# Altium footprint library Connectors.PcbLib: 113 footprints (part 4 of 8)
Each footprint in its own frame and in the unit in brackets; x right, y up, seen from the top. Pads: shape width x height; smd on the part's side, far side on the other; paste and mask are expansions set on the pad; w line width, h text height; cw(c..) or ccw(c..) is an arc to the next point about the centre after c.
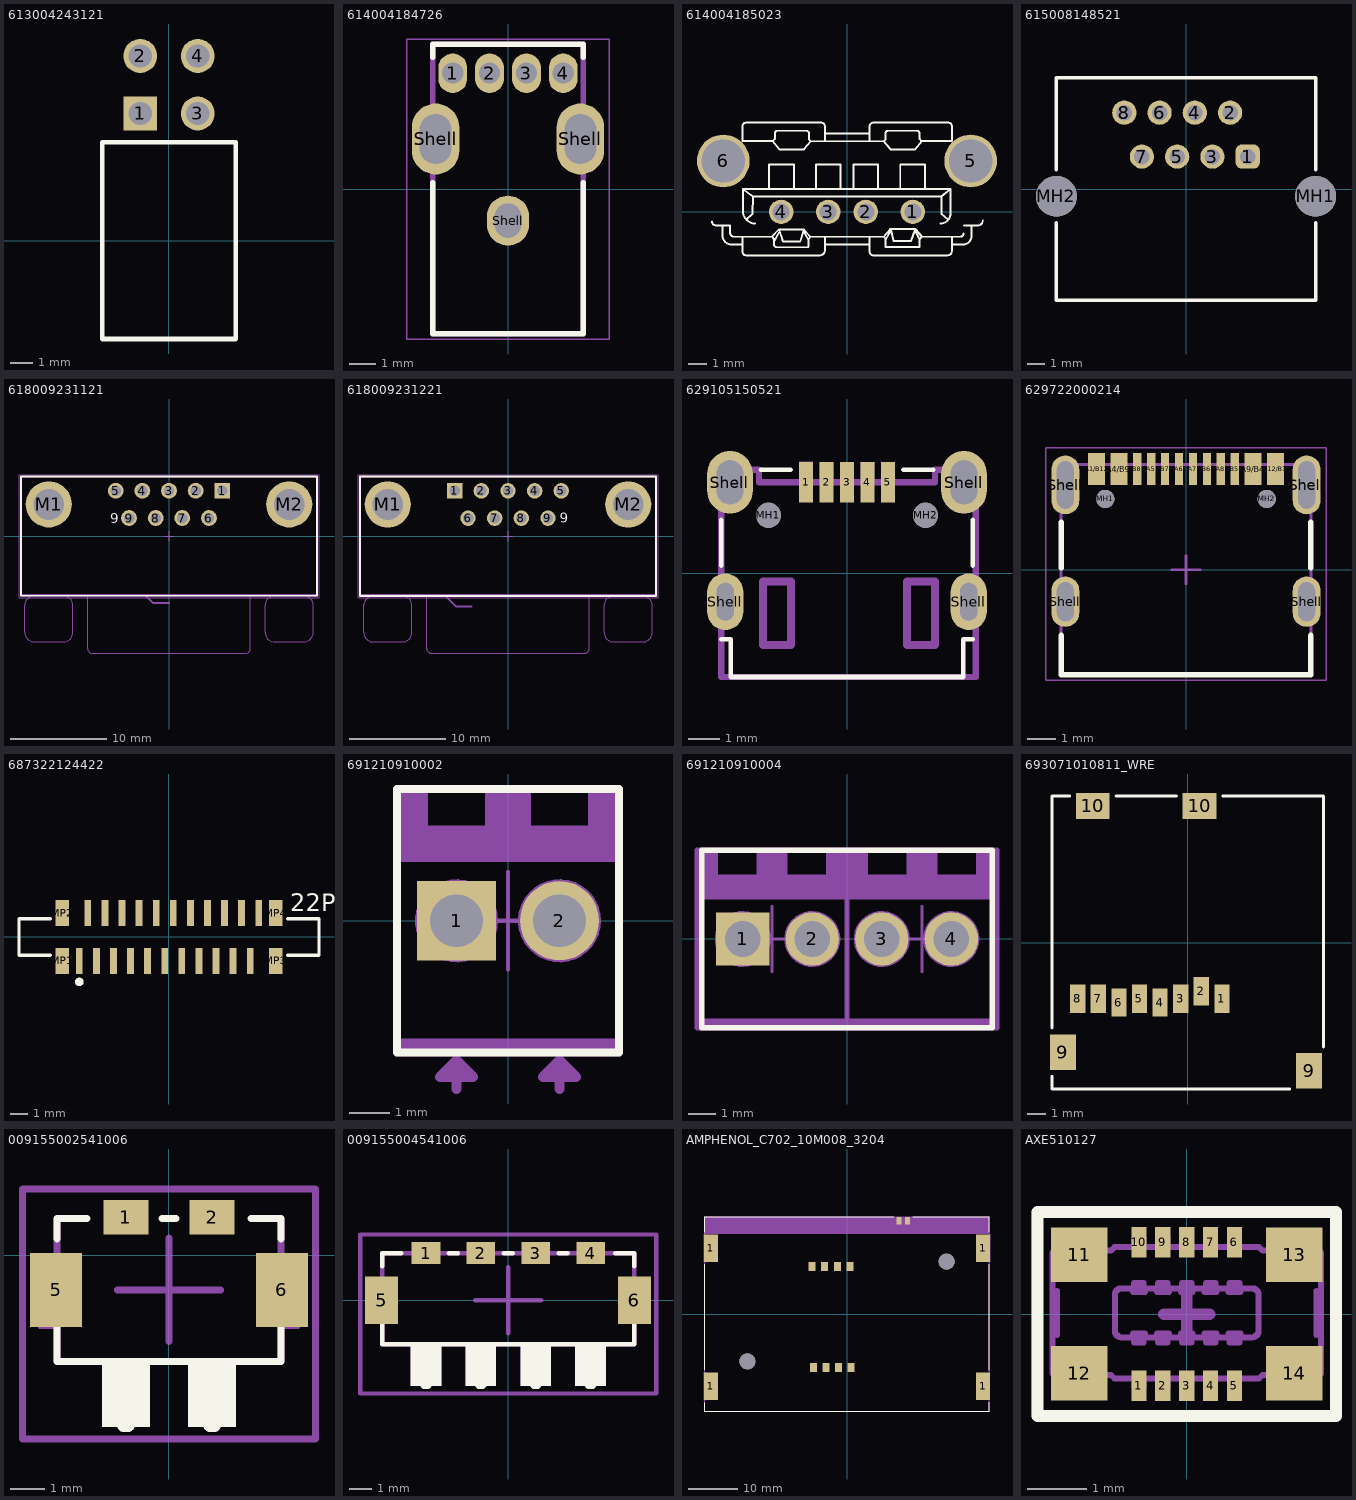
[diagram p3: the footprints below, top view; thin cyan lines are the x and y axes]

## 613004243121 [mm] "Socket Header, Pitch 2.54 mm, THT, Angled, dual row, 4p"
height 5.08
pads (4):
  rect 1.5x1.5 hole 1.02: 1(-1.27,5.61)
  round 1.5 hole 1.02: 2(-1.27,8.15) 3(1.27,5.61) 4(1.27,8.15)
Top Overlay:
  lines w0.2: -2.94,-4.35 2.94,-4.35 2.94,4.35 -2.94,4.35 -2.94,-4.35
3D body "613004243121.stp": height 5.05, standoff -3.25, extent -2.79,-4.25 2.79,8.35

## 614004184726 [mm] "USB 2.0 Type A Up Right THT"
height 14.2
pads (7):
  oval 1.1x1.5 hole 0.8: 1(-2.1,4.4) 2(-0.7,4.4) 3(0.7,4.4) 4(2.1,4.4)
  oval 1.8x2.7 hole 1.2 slot 1.9 at 90 deg: Shell(-2.75,1.9) Shell(2.75,1.9)
  oval 1.6x1.9 hole 1 slot 1.3 at 90 deg: Shell(0,-1.2)
Top Overlay:
  lines w0.2: -2.86,0.25 -2.86,-5.5 2.86,-5.5 2.86,0.25 ; -2.86,5 -2.86,5.5 2.86,5.5 2.86,5
Top Assembly:
  lines w0.2: -2.86,-5.5 -2.86,5.5 2.86,5.5 2.86,-5.5 -2.86,-5.5
  text ".Designator" at 0.5,-7.497 h1.5
Mechanical 15:
  lines w0.05: -3.85,-5.7 -3.85,5.7 3.85,5.7 3.85,-5.7 -3.85,-5.7
3D body "614004184726.stp": height 14.3, standoff -2.74, extent -3.559,-5.5 3.559,5.5

## 614004185023 [mm]
pads (6):
  round 1.3 / inner round 1.524 / far side round 1.3 hole 0.9: 1(3.5,0) 2(1,0) 3(-1,0) 4(-3.5,0)
  round 2.8 / inner round 1.524 / far side round 2.8 hole 2.3: 5(6.57,2.71) 6(-6.57,2.71)
Top Overlay:
  lines w0.102: -7.175,-0.507 ccw(c-6.961,-0.507) -6.961,-0.721 -6.211,-0.721 -6.211,-1.107 ccw(c-5.997,-1.107) -5.997,-1.321 -3.962,-1.321 -3.877,-1.471 -3.877,-1.728 ccw(c-3.727,-1.728) -3.727,-1.878 -2.099,-1.878 ccw(c-2.099,-1.835) -2.056,-1.835 -2.056,-1.471 ; -6.618,-0.743 -6.618,-1.257 ccw(c-6.147,-1.257) -6.147,-1.728 -5.547,-1.728 ; -5.547,-1.321 -5.547,-1.728 ; -5.547,3.755 -5.547,4.569 cw(c-5.376,4.569) -5.376,4.74 -1.349,4.74 cw(c-1.349,4.569) -1.178,4.569 -1.178,3.755 ; -5.547,3.777 -3.919,3.777 -3.834,3.884 -3.834,4.183 cw(c-3.705,4.183) -3.705,4.312 -2.163,4.312 cw(c-2.163,4.162) -2.013,4.162 -2.013,3.841 -1.928,3.755 ; -5.333,-0.378 -5.012,-0.1 -4.99,0.821 ; -4.883,-0.614 cw(c-4.883,0.028) -5.526,0.029 -5.526,1.206 ; -4.134,1.249 -4.134,2.513 -2.806,2.513 -2.806,1.249 ; -3.962,-1.299 -3.619,-0.935 -2.292,-0.935 -1.949,-1.321 ; -3.941,3.755 -3.598,3.327 -2.292,3.327 -1.928,3.755 ; -3.855,-1.514 -3.598,-1.064 ; -3.598,-0.957 -3.405,-1.578 -2.485,-1.578 -2.313,-1.021 -2.056,-1.471 ; -1.671,1.228 -1.649,1.228 -1.649,2.513 -0.343,2.513 -0.343,1.271 ; -1.157,-1.728 1.199,-1.728 ; -1.157,4.162 1.199,4.162 ; 0.343,1.249 0.343,2.513 1.649,2.513 1.649,1.228 ; 1.199,-1.321 1.199,-1.728 ; 2.056,-1.471 2.335,-0.957 2.463,-1.535 3.405,-1.535 3.619,-0.957 ; 2.827,1.228 2.827,2.513 4.134,2.513 4.134,1.228 ; 3.598,-0.978 3.855,-1.45 ; 3.962,3.755 3.619,3.327 2.313,3.327 1.949,3.755 ; 4.969,-0.614 ccw(c4.969,-0.079) 5.504,-0.079 5.504,1.206 5.483,1.206 ; 5.355,-0.4 5.012,-0.1 5.012,0.821 ; 6.19,-1.15 cw(c6.018,-1.15) 6.019,-1.321 5.569,-1.321 ; 6.211,-0.721 6.939,-0.721 ccw(c6.939,-0.443) 7.218,-0.443 ; 6.618,-0.743 6.618,-1.278 cw(c6.168,-1.278) 6.168,-1.728 5.569,-1.728 ; -5.547,-1.728 -5.547,-2.135 ccw(c-5.376,-2.135) -5.376,-2.306 -1.435,-2.306 ccw(c-1.435,-2.049) -1.178,-2.049 -1.178,-1.321 ; -5.526,1.206 -4.99,0.821 ; -5.526,1.206 5.483,1.206 ; -4.99,0.821 5.012,0.821 ; -2.056,-1.471 -1.949,-1.321 ; -1.949,-1.321 -1.178,-1.321 ; -1.928,3.755 -1.178,3.755 ; -1.178,-1.321 1.949,-1.321 ; -1.178,3.755 1.199,3.755 ; 1.199,-1.728 1.199,-2.113 ccw(c1.392,-2.113) 1.392,-2.306 5.355,-2.306 ccw(c5.355,-2.092) 5.569,-2.092 5.569,-1.728 ; 1.199,3.755 1.949,3.755 ; 1.199,3.755 1.199,4.162 ; 1.199,4.162 1.199,4.548 cw(c1.392,4.548) 1.392,4.74 5.397,4.74 cw(c5.397,4.569) 5.569,4.569 5.569,3.777 3.941,3.777 3.855,3.884 3.855,4.183 ccw(c3.727,4.183) 3.727,4.312 2.185,4.312 ccw(c2.185,4.162) 2.035,4.162 2.035,3.841 1.949,3.755 ; 1.949,-1.321 2.035,-1.407 2.035,-1.856 3.855,-1.856 3.855,-1.45 ; 1.949,-1.321 2.292,-0.914 3.641,-0.914 3.984,-1.321 ; 3.855,-1.45 3.984,-1.321 ; 3.984,-1.321 5.569,-1.321 ; 5.012,0.821 5.483,1.206 ; 5.569,-1.728 5.569,-1.321
3D body "614004185023_ShortTypeA.stp": height 10.01, standoff -2.99, extent -7.15,-2.2 7.15,5.2

## 615008148521 [mm] "Modular Jack Horizontal Plastic 8P8C Tab Up"
height 14.5
pads (10):
  rrect50% 1.4x1.4 hole 0.9: 1(3.57,1.875)
  round 1.4 hole 0.9: 2(2.55,4.415) 3(1.53,1.875) 4(0.51,4.415) 5(-0.51,1.875) 6(-1.53,4.415) 7(-2.55,1.875) 8(-3.57,4.415)
  round 2.36 hole 2.36 unplated: MH1(7.5,-0.425) MH2(-7.5,-0.425)
Top Overlay:
  lines w0.2: -7.5,-1.95 -7.5,-6.425 7.5,-6.425 7.5,-1.95 ; -7.5,1.1 -7.5,6.425 7.5,6.425 7.5,1.1
3D body "615008148521.stp": height 14.55, standoff -3.25, extent -8.74,-6.425 8.74,6.425

## 618009231121 [mm] "9 pins, right angled, 8.08mm, with hex screw"
height 12.5
pads (11):
  rect 1.65x1.65 hole 1.09: 1(5.54,4.72)
  round 1.65 hole 1.09: 2(2.77,4.72) 3(0,4.72) 4(-2.77,4.72) 5(-5.54,4.72) 6(4.155,1.88) 7(1.385,1.88) 8(-1.385,1.88) 9(-4.155,1.88)
  round 4.8 hole 3.2: M1(-12.5,3.3) M2(12.5,3.3)
Top Overlay:
  lines w0.2: -15.4,-6.2 15.4,-6.2 15.4,6.2 -15.4,6.2 -15.4,-6.2
  text "9" at -6.1,1.35 h1.02
Top Courtyard:
  lines w0.2: -15.4,-6.12 15.4,-6.12 ; -2.5,-6.12 -1.67,-6.95 0,-6.95
  text "PCB Edge" at 0.4,-7.55 h1.02
Top Assembly:
  lines w0.1: -14,-6.2 ccw(c-14,-7.2) -15,-7.2 -15,-10 ccw(c-14,-10) -14,-11 -11,-11 ccw(c-11,-10) -10,-10 -10,-7.2 ccw(c-11,-7.2) -11,-6.2 ; -8.45,-6.2 -8.45,-11.7 ccw(c-7.95,-11.7) -7.95,-12.2 7.95,-12.2 ; 8.45,-6.2 8.45,-11.7 cw(c7.95,-11.7) 7.95,-12.2 ; 11,-6.2 ccw(c11,-7.2) 10,-7.2 10,-10 ccw(c11,-10) 11,-11 14,-11 ccw(c14,-10) 15,-10 15,-7.2 ccw(c14,-7.2) 14,-6.2 ; 7.95,-12.2 7.95,-12.2 ; -15.4,-6.2 -15.4,6.2 15.4,6.2 15.4,-6.2 -15.4,-6.2
Mechanical 15:
  lines w0.05: -0.5,0 0.5,0 ; 0,-0.5 0,0.5 ; -15.6,-6.4 15.6,-6.4 15.6,6.4 -15.6,6.4 -15.6,-6.4
3D body "618009231121 (rev1).stp": height 12.55, standoff -3.95, extent -15.4,-12.2 15.4,6.2

## 618009231221 [mm] "9 pins, right angled, 8.08mm, with hex screw"
height 12.5
pads (11):
  rect 1.6x1.6 hole 1.09: 1(-5.54,4.72)
  round 1.6 hole 1.09: 2(-2.77,4.72) 3(0,4.72) 4(2.77,4.72) 5(5.54,4.72) 6(-4.155,1.88) 7(-1.385,1.88) 8(1.385,1.88) 9(4.155,1.88)
  round 4.8 hole 3.2: M1(-12.5,3.3) M2(12.5,3.3)
Top Overlay:
  lines w0.2: -15.4,-6.2 -15.4,6.2 15.4,6.2 15.4,-6.2 -15.4,-6.2
  text "9" at 5.4,1.4 h1.02
Top Courtyard:
  lines w0.2: -15.4,-6.12 15.4,-6.12 ; -6.6,-6.12 -5.42,-7.3 -3.8,-7.3
  text "PCB Edge" at -3.4,-7.82 h1.02
Top Assembly:
  lines w0.1: -14,-6.2 ccw(c-14,-7.2) -15,-7.2 -15,-10 ccw(c-14,-10) -14,-11 -11,-11 ccw(c-11,-10) -10,-10 -10,-7.2 ccw(c-11,-7.2) -11,-6.2 ; -8.46,-6.2 -8.46,-11.68 ccw(c-7.96,-11.68) -7.96,-12.18 7.94,-12.18 ; 7.96,-12.18 ccw(c7.96,-11.68) 8.46,-11.68 8.46,-6.2 ; 11,-6.2 ccw(c11,-7.2) 10,-7.2 10,-10 ccw(c11,-10) 11,-11 14,-11 ccw(c14,-10) 15,-10 15,-7.2 ccw(c14,-7.2) 14,-6.2 ; -15.4,-6.2 15.4,-6.2 15.4,6.2 -15.4,6.2 -15.4,-6.2 ; 7.95,-12.18 7.95,-12.18
Mechanical 15:
  lines w0.05: -0.5,0 0.5,0 ; 0,-0.5 0,0.5 ; -15.6,-6.4 15.6,-6.4 15.6,6.4 -15.6,6.4 -15.6,-6.4
3D body "618009231221 (rev1).stp": height 12.55, standoff -3.95, extent -15.4,-12.2 15.4,6.2

## 629105150521 [mm] "Micro USB 2.0 SMT Type B Horizontal 5 Contacts High Current"
height 2.66
pads (11):
  rect 0.45x1.3 smd: 1(-1.3,2.9) 2(-0.65,2.9) 3(0,2.9) 4(0.65,2.9) 5(1.3,2.9)
  round 0.8 hole 0.8 unplated: MH1(-2.5,1.85) MH2(2.5,1.85)
  oval 1.15x1.8 hole 0.55 slot 1.2 at 90 deg: Shell(-3.875,-0.9) Shell(3.875,-0.9)
  oval 1.45x2 hole 0.85 slot 1.4 at 90 deg: Shell(-3.725,2.9) Shell(3.725,2.9)
Top Overlay:
  lines w0.15: -4,-2.1 -3.7,-2.1 -3.7,-3.3 3.7,-3.3 3.7,-2.1 4,-2.1 ; -4,0.25 -4,1.7 ; -2.75,3.3 -1.8,3.3 ; 1.8,3.3 2.75,3.3 ; 4,0.25 4,1.7
Top Assembly:
  rectangle: -1.524,2.895 -1.075,3.556
  rectangle: -0.875,2.895 -0.425,3.55
  rectangle: -0.225,2.9 0.225,3.55
  rectangle: 0.425,2.95 0.875,3.55
  rectangle: 1.075,2.9 1.525,3.55
  lines w0.2: -4,-3.3 4.1,-3.3 4.1,3.3 2.8,3.3 2.8,2.9 -2.8,2.9 -2.8,3.3 -4,3.3 -4,-3.3
  lines w0.254: -2.667,-2.286 -2.667,-0.254 -1.778,-0.254 -1.778,-2.286 -2.667,-2.286 ; 1.905,-2.286 2.794,-2.286 2.794,-0.254 1.905,-0.254 1.905,-2.286
  text ".Designator" at -4.998,0.808 h1
3D body "629105150521.stp": height 2.75, standoff -1.77, extent -4,-3.3 4,3.303

## 629722000214 [mm] "USB TYPE C VERTICAL PLUG"
height 3.31
pads (18):
  rect 0.6x1.14 smd: A1/B12(-3.2,3.605) A4/B9(-2.4,3.605) A9/B4(2.4,3.605) A12/B1(3.2,3.605)
  rect 0.3x1.14 smd: A5(-1.25,3.605) A6(-0.25,3.605) A7(0.25,3.605) A8(1.25,3.605) B5(1.75,3.605) B6(0.75,3.605) B7(-0.75,3.605) B8(-1.75,3.605)
  round 0.65 hole 0.65 unplated: MH1(-2.89,2.535) MH2(2.89,2.535)
  oval 1x1.8 hole 0.6 slot 1.4 at 90 deg: Shell(-4.32,-1.145) Shell(4.32,-1.145)
  oval 1x2.1 hole 0.6 slot 1.7 at 90 deg: Shell(-4.32,3.035) Shell(4.32,3.035)
Top Overlay:
  lines w0.2: -4.47,-2.355 -4.47,-3.765 4.47,-3.765 4.47,-2.355 ; -4.47,0.065 -4.47,1.695 ; 4.47,0.065 4.47,1.695
Top Courtyard:
  lines w0.05: -5.02,-3.965 -5.02,4.375 5.02,4.375 5.02,-3.965 -5.02,-3.965
Top 3D Body:
  lines w0.1: -4.47,-3.765 4.47,-3.765 4.47,3.765 -4.47,3.765 -4.47,-3.765
Top Assembly:
  lines w0.1: -4.47,-3.765 4.47,-3.765 4.47,3.765 -4.47,3.765 -4.47,-3.765
  text ".Designator" at -2.251,-0.226 h1
Top Component Center:
  lines w0.1: -0.5,0 0.5,0 ; 0,-0.5 0,0.5
3D body "629722000214.stp": height 3.33, standoff -0.83, extent -4.79,-3.765 4.79,3.945

## 687322124422 [mm] "ZIF Connectors, Vertical, Type A, pitch 0.5mm, 22p"
height 4.5
pads (26):
  rect 0.4x1.5 smd: 1(-5.25,-1.4) 2(-4.75,1.4) 3(-4.25,-1.4) 4(-3.75,1.4) 5(-3.25,-1.4) 6(-2.75,1.4) 7(-2.25,-1.4) 8(-1.75,1.4) 9(-1.25,-1.4) 10(-0.75,1.4) 11(-0.25,-1.4) 12(0.25,1.4) 13(0.75,-1.4) 14(1.25,1.4) 15(1.75,-1.4) 16(2.25,1.4) 17(2.75,-1.4) 18(3.25,1.4) 19(3.75,-1.4) 20(4.25,1.4) 21(4.75,-1.4) 22(5.25,1.4)
  rect 0.8x1.5 smd: MP1(-6.25,-1.4) MP2(-6.25,1.4) MP3(6.25,-1.4) MP4(6.25,1.4)
Top Overlay:
  circle w0.25: c-5.25,-2.625 r0.125
  lines w0.2: -6.95,-1.075 -8.775,-1.075 -8.775,1.075 -6.95,1.075 ; 6.95,-1.075 8.775,-1.075 8.775,1.075 6.95,1.075
  text "22P" at 7.1,1.5 h1.02
3D body "687322124422.stp": height 4.92, standoff 0.02, extent -8.7,-1.75 8.7,1.75

## 691210910002 [mm] "2,54mm - modular - green - Horizontal wire entry - Cage clamp - 0,8mm2 wires - 02p"
height 8.5
pads (2):
  rect 1.95x1.95 hole 1.3: 1(-1.27,0)
  round 1.95 hole 1.3: 2(1.27,0)
Top Overlay:
  lines w0.2: -2.74,-3.25 2.74,-3.25 2.74,3.25 -2.74,3.25 -2.74,-3.25
Top Assembly:
  circle w0.1: c-1.27,0 r0.975
  circle w0.1: c1.27,0 r0.975
  rectangle: -2.74,1.45 2.74,2.35
  rectangle: -2.74,2.1 -1.97,3.25
  rectangle: -0.57,2.1 0.57,3.25
  rectangle: 1.97,2.1 2.74,3.25
  rectangle: -2.74,-3.25 2.74,-2.9
  lines w0.1: -2.74,-3.25 2.74,-3.25 2.74,3.25 -2.74,3.25 -2.74,-3.25 ; -2.091,-0.526 -0.867,0.886 ; -1.673,-0.886 -0.449,0.526 ; 0.449,-0.526 1.673,0.886 ; 0.867,-0.886 2.091,0.526
  lines w0.25: -1.27,-4.15 -1.27,-3.45 ; 1.27,-4.15 1.27,-3.45 ; -1.27,-3.45 -1.267,-3.45 -0.867,-3.85 -1.673,-3.85 -1.273,-3.45 -1.27,-3.45 ; 1.27,-3.45 1.273,-3.45 1.673,-3.85 0.867,-3.85 1.267,-3.45 1.27,-3.45
  text ".Designator" at -4.998,-2.233 h1
Mechanical 15:
  lines w0.1: -1.2,0 1.2,0 ; 0,-1.2 0,1.2
  lines w0.2: -2.74,-3.25 2.74,-3.25 2.74,3.25 -2.74,3.25 -2.74,-3.25
3D body "691210910002.stp": height 8.55, standoff -3.45, extent -2.74,-3.25 2.74,3.25

## 691210910004 [mm]
pads (4):
  rect 1.95x1.95 hole 1.3: 1(-3.81,0)
  round 1.95 hole 1.3: 2(-1.27,0) 3(1.27,0) 4(3.81,0)
Top Overlay:
  lines w0.2: -5.3,-3.25 -5.3,3.25 0,3.25 5.3,3.25 5.3,-3.25 0,-3.25 -5.3,-3.25
Top Assembly:
  circle w0.1: c-1.27,0.002 r0.975
  circle w0.1: c-3.81,0.002 r0.975
  circle w0.1: c1.27,0.001 r0.975
  circle w0.1: c3.81,0.001 r0.975
  rectangle: -5.48,-3.25 0.77,-2.9
  rectangle: -0.77,2.1 0.649,3.25
  rectangle: -3.31,2.1 -2.17,3.25
  rectangle: -5.48,2.1 -4.71,3.25
  rectangle: -5.48,1.45 0.649,2.35
  rectangle: 0,-3.25 5.48,-2.9
  rectangle: 4.71,2.1 5.48,3.25
  rectangle: 2.17,2.1 3.31,3.25
  rectangle: 0,2.1 0.77,3.25
  rectangle: 0,1.45 5.48,2.35
  lines w0.1: -4.631,-0.525 -3.407,0.888 ; -4.213,-0.885 -2.989,0.528 ; -2.091,-0.525 -0.867,0.888 ; -1.673,-0.885 -0.449,0.528 ; 0.449,-0.525 1.673,0.888 ; 0.867,-0.885 2.091,0.528 ; 2.989,-0.525 4.213,0.888 ; 3.407,-0.885 4.631,0.528 ; -5.48,-3.25 0,-3.25 5.48,-3.25 5.48,3.25 0,3.25 -5.48,3.25 -5.48,-3.25
  text ".Designator" at -4.999,-2.141 h1
Mechanical 15:
  lines w0.1: -3.94,0 -1.54,0 ; -2.74,-1.2 -2.74,1.2 ; 1.54,0 3.94,0 ; 2.74,-1.2 2.74,1.2
  lines w0.2: 0,-3.25 -5.48,-3.25 -5.48,3.25 0,3.25 ; 0,-3.25 0,3.25 ; 0,-3.25 0,3.25 ; 0,-3.25 5.48,-3.25 5.48,3.25 0,3.25
3D body "Download_STP_691210910004 (rev1).stp": height 8.51, standoff -3.49, extent -5.28,-3.25 5.28,3.25

## 693071010811_WRE [mil]
pads (12):
  rect 32x59 smd paste+0 mask+0: 1(71.46,-118.26) 2(28.15,-102.51) 3(-15.15,-118.26) 4(-58.46,-126.13) 5(-101.77,-118.26) 6(-145.08,-126.13) 7(-188.39,-118.26) 8(-231.7,-118.26)
  rect 55x75 smd: 9(-262.8,-230.46) 9(254.92,-269.83)
  rect 71x55 smd: 10(-199.8,287.25) 10(24.61,287.25)
Top Overlay:
  lines w6: -285.5,-281.06 -285.5,-308 214.34,-308 ; -285.5,-179.86 -285.5,308 -248.4,308 ; -151.2,308 -23.99,308 ; 73.21,308 285.5,308 285.5,-219.6
3D body "693071010811.stp": height 72.05, standoff -2.76, extent -279.53,-300.2 271.66,298.23

## 009155002541006 [mm]
pads (4):
  rect 1.3x1 smd: 1(-1.25,1.1) 2(1.25,1.1)
  rect 1.5x2.15 smd: 5(-3.275,-1) 6(3.275,-1)
Top Overlay:
  rectangle: 0.55,-4.974 1.95,-3.075
  rectangle: -1.95,-4.974 -0.55,-3.075
  rectangle: -1.455,-5.028 -1.045,-4.919
  rectangle: 1.045,-5.028 1.455,-4.919
  lines w0.1: -1.455,-4.919 ccw(c-1.3,-4.919) -1.3,-5.074 -1.2,-5.074 ccw(c-1.2,-4.919) -1.045,-4.919 ; 1.045,-4.919 ccw(c1.2,-4.919) 1.2,-5.074 1.3,-5.074 ccw(c1.3,-4.919) 1.455,-4.919
  lines w0.2: -3.25,-1.429 -3.25,-3.075 1.55,-3.075 3.25,-3.075 3.25,-1.429 ; -3.25,0.473 -3.25,1.075 -2.378,1.075 ; -0.208,1.075 0.208,1.075 ; 2.378,1.075 3.25,1.075 3.25,0.473
Top Assembly:
  rectangle: 0.55,-4.975 1.95,-3.075
  rectangle: -1.95,-4.975 -0.55,-3.075
  region: -3.232,-0.361 -3.439,-0.361 -3.439,-0.784 -3.232,-0.784
  region: -3.24,-0.752 -3.394,-0.752 -3.394,-0.928 -3.24,-0.928
  region: -3.342,-0.654 -3.577,-0.654 -3.577,-0.735 -3.342,-0.735
  region: -3.341,-0.641 -3.492,-0.641 -3.492,-0.823 -3.341,-0.823
  region: -3.194,-0.724 -3.333,-0.724 -3.333,-0.859 -3.194,-0.859
  region: -3.163,-0.7 -3.194,-0.7 -3.194,-0.724 -3.163,-0.724
  region: -3.279,-1.28 -3.412,-1.28 -3.412,-1.493 -3.279,-1.493
  region: -3.229,-1.384 -3.552,-1.384 -3.552,-1.511 -3.229,-1.511
  rectangle: -3.75,-2.075 -3.232,-1.486
  rectangle: -3.75,-0.692 -3.232,-0.103
  rectangle: -3.344,-2.089 -3.25,-0.089
  rectangle: -1.699,1.075 -0.794,1.425
  rectangle: 0.801,1.075 1.706,1.425
  rectangle: -1.455,-5.028 -1.045,-4.92
  rectangle: 1.045,-5.028 1.455,-4.92
  rectangle: 3.232,-0.784 3.439,-0.361
  rectangle: 3.24,-0.928 3.394,-0.752
  rectangle: 3.342,-0.735 3.577,-0.654
  rectangle: 3.341,-0.823 3.492,-0.641
  rectangle: 3.194,-0.859 3.333,-0.724
  rectangle: 3.163,-0.724 3.194,-0.7
  rectangle: 3.279,-1.493 3.412,-1.28
  rectangle: 3.229,-1.511 3.552,-1.384
  region: 3.75,-1.486 3.232,-1.486 3.232,-2.075 3.75,-2.075
  region: 3.75,-0.103 3.232,-0.103 3.232,-0.692 3.75,-0.692
  region: 3.344,-0.089 3.25,-0.089 3.25,-2.089 3.344,-2.089
  lines w0.1: -3.269,-0.089 -3.744,-0.089 -3.744,-0.689 cw(c-3.744,-1.089) -3.344,-1.089 cw(c-3.744,-1.089) -3.744,-1.489 -3.744,-2.089 -3.232,-2.089 ; -3.25,-0.925 -3.25,1.075 ; -1.455,-4.92 ccw(c-1.3,-4.92) -1.3,-5.075 -1.2,-5.075 ccw(c-1.2,-4.92) -1.045,-4.92 ; 1.045,-4.92 ccw(c1.2,-4.92) 1.2,-5.075 1.3,-5.075 ccw(c1.3,-4.92) 1.455,-4.92 ; 3.232,-2.089 3.744,-2.089 3.744,-1.489 cw(c3.744,-1.089) 3.344,-1.089 cw(c3.744,-1.089) 3.744,-0.689 3.744,-0.089 3.269,-0.089 ; 3.25,-0.925 3.25,1.075
  lines w0.2: -3.25,-3.075 -3.25,1.075 ; 3.25,-3.075 3.25,1.075
  text ".Designator" at -7.618,-1.508 h1.52
Mechanical 15:
  lines w0.2: -1.5,-1 1.5,-1 ; 0,-2.5 0,0.5 ; -4.25,-5.325 -4.25,1.925 4.25,1.925 4.25,-5.325 -4.25,-5.325
3D body "AVX-00-9155-002-541-006 v4.step": height 3.91, standoff 0.01, extent -3.75,-5 3.75,1.5

## 009155004541006 [mm]
pads (6):
  rect 1.3x1 smd: 1(-3.75,2.15) 2(-1.25,2.15) 3(1.25,2.15) 4(3.75,2.15)
  rect 1.5x2.15 smd: 5(-5.775,0) 6(5.75,0)
Top Overlay:
  rectangle: 3.545,-3.953 3.955,-3.844
  rectangle: 1.045,-3.953 1.455,-3.844
  rectangle: -1.455,-3.953 -1.045,-3.844
  rectangle: -3.955,-3.953 -3.545,-3.844
  rectangle: -4.45,-3.9 -3.05,-2
  rectangle: -1.95,-3.9 -0.55,-2
  rectangle: 0.55,-3.9 1.95,-2
  rectangle: 3.05,-3.9 4.45,-2
  lines w0.1: -3.955,-3.844 ccw(c-3.8,-3.844) -3.8,-4 -3.7,-4 ccw(c-3.7,-3.844) -3.545,-3.844 ; -1.455,-3.844 ccw(c-1.3,-3.844) -1.3,-4 -1.2,-4 ccw(c-1.2,-3.844) -1.045,-3.844 ; 1.045,-3.844 ccw(c1.2,-3.844) 1.2,-4 1.3,-4 ccw(c1.3,-3.844) 1.455,-3.844 ; 3.545,-3.844 ccw(c3.7,-3.844) 3.7,-4 3.8,-4 ccw(c3.8,-3.844) 3.955,-3.844
  lines w0.2: -5.75,-0.354 -5.75,-2 -0.95,-2 5.75,-2 5.75,-0.295 ; -5.75,1.548 -5.75,2.15 -4.878,2.15 ; -2.708,2.15 -2.293,2.15 ; -0.208,2.15 0.207,2.15 ; 2.292,2.15 2.707,2.15 ; 4.878,2.15 5.75,2.15 5.75,1.548
Top Assembly:
  rectangle: 3.545,-3.953 3.955,-3.845
  rectangle: 1.045,-3.953 1.455,-3.845
  rectangle: -1.455,-3.953 -1.045,-3.845
  rectangle: -3.955,-3.953 -3.545,-3.845
  rectangle: 3.301,2.15 4.206,2.5
  rectangle: 0.801,2.15 1.705,2.5
  rectangle: -1.699,2.15 -0.795,2.5
  rectangle: -4.199,2.15 -3.295,2.5
  region: 5.85,1 5.75,1 5.75,-1 5.85,-1
  region: 6.256,0.986 5.738,0.986 5.738,0.397 6.256,0.397
  region: 6.256,-0.397 5.738,-0.397 5.738,-0.986 6.256,-0.986
  rectangle: 5.735,-0.422 6.058,-0.295
  rectangle: 5.785,-0.404 5.918,-0.191
  rectangle: 5.7,0.23 5.839,0.365
  rectangle: 5.847,0.266 5.998,0.448
  rectangle: 5.848,0.354 6.083,0.434
  rectangle: 5.746,0.161 5.9,0.337
  rectangle: 5.738,0.305 5.945,0.728
  rectangle: -5.844,-1.014 -5.75,0.986
  rectangle: -6.25,0.383 -5.733,0.972
  rectangle: -6.25,-1 -5.733,-0.411
  region: -5.73,-0.309 -6.052,-0.309 -6.052,-0.436 -5.73,-0.436
  region: -5.779,-0.205 -5.912,-0.205 -5.912,-0.418 -5.779,-0.418
  region: -5.663,0.375 -5.695,0.375 -5.695,0.351 -5.663,0.351
  region: -5.695,0.351 -5.833,0.351 -5.833,0.216 -5.695,0.216
  region: -5.841,0.434 -5.992,0.434 -5.992,0.252 -5.841,0.252
  region: -5.843,0.42 -6.077,0.42 -6.077,0.34 -5.843,0.34
  region: -5.74,0.323 -5.894,0.323 -5.894,0.147 -5.74,0.147
  region: -5.733,0.714 -5.939,0.714 -5.939,0.291 -5.733,0.291
  rectangle: -4.45,-3.9 -3.05,-2
  rectangle: -1.95,-3.9 -0.55,-2
  rectangle: 0.55,-3.9 1.95,-2
  rectangle: 3.05,-3.9 4.45,-2
  lines w0.1: -5.769,0.986 -6.244,0.986 -6.244,0.386 cw(c-6.244,-0.014) -5.844,-0.014 cw(c-6.244,-0.014) -6.244,-0.414 -6.244,-1.014 -5.733,-1.014 ; -5.75,0.15 -5.75,2.15 ; -3.955,-3.845 ccw(c-3.8,-3.845) -3.8,-4 -3.7,-4 ccw(c-3.7,-3.845) -3.545,-3.845 ; -1.455,-3.845 ccw(c-1.3,-3.845) -1.3,-4 -1.2,-4 ccw(c-1.2,-3.845) -1.045,-3.845 ; 1.045,-3.845 ccw(c1.2,-3.845) 1.2,-4 1.3,-4 ccw(c1.3,-3.845) 1.455,-3.845 ; 3.545,-3.845 ccw(c3.7,-3.845) 3.7,-4 3.8,-4 ccw(c3.8,-3.845) 3.955,-3.845 ; 5.75,-1 6.25,-1 6.25,-0.4 cw(c6.25,0) 5.85,0 cw(c6.25,0) 6.25,0.4 6.25,1 5.775,1
  lines w0.2: -5.75,-2 -5.75,2.15 5.75,2.15 5.75,-2 -5.75,-2
  text ".Designator" at -7.618,-0.508 h1.52
Mechanical 15:
  lines w0.2: -1.5,0 1.5,0 ; 0,-1.5 0,1.5 ; -6.75,-4.25 6.75,-4.25 6.75,3 -6.75,3 -6.75,-4.25
3D body "AVX-00-9155-004-541-006 v2.step": height 3.8, standoff -0.1, extent -6.25,-3.999 6.25,2.5

## AMPHENOL_C702_10M008_3204 [mm]
pads (16):
  rect 2.8x5.6 smd: 1(-27.3,-14.5) 1(-27.3,13.2) 1(27.3,-14.5) 1(27.3,13.2)
  rect 1.4x1.8 smd: C1(-7.02,9.5) C2(-4.48,9.5) C3(-1.94,9.5) C4(0.6,9.5) C5(-6.77,-10.7) C6(-4.23,-10.7) C7(-1.69,-10.7) C8(0.85,-10.7)
  rect 1x1.5 smd: SW1(10.4,18.7) SW2(12.1,18.7)
  round 3.2 hole 3.2 unplated: ""(-20,-9.5) ""(20,10.5)
Top Overlay:
  lines w0.2: -28.5,-17.8 -28.5,-19.5 28.5,-19.5 28.5,-17.75 ; -28.5,-11.2 -28.5,10 ; -28.5,16.4 -28.5,19.5 9.4,19.5 ; 13.2,19.5 28.5,19.5 28.5,16.4 ; 28.5,-11.25 28.5,10
Top Assembly:
  rectangle: -28.5,16.1 28.5,19.5
  rectangle: 28.5,10.3 28.8,16.1
  rectangle: -28.8,10.3 -28.4,16.1
  rectangle: -28.8,-17.4 -28.4,-11.6
  lines w0.2: -28.5,-19.5 -28.5,19.5 28.5,19.5 28.5,-19.5 -28.5,-19.5
  text ".Designator" at -14.995,-1 h3
3D body "C702 10M008 3204--3DModel-STEP-1.STEP": height 6, standoff -1.3, extent -28.5,-19.5 28.5,19.5

## AXE510127 [mil]
pads (14):
  rect 10x20 smd paste+0 mask+0: 1(-31.5,-47.24) 2(-15.75,-47.24) 3(0,-47.24) 4(15.75,-47.24) 5(31.5,-47.24) 6(31.5,47.24) 7(15.75,47.24) 8(0,47.24) 9(-15.75,47.24) 10(-31.5,47.24)
  rect 37x36 smd: 11(-70.87,38.98) 12(-70.87,-38.98) 13(70.87,38.98) 14(70.87,-38.98)
Top Overlay:
  lines w6: -98.43,-8.59 -98.43,8.59 ; 98.43,-8.59 98.43,8.59
  lines w7.87: -98.43,-67.24 98.43,-67.24 98.43,67.24 -98.43,67.24 -98.43,8.59 -98.43,-67.24
Top Assembly:
  drawing of 190 lines, arcs and shapes, not listed
  text ".Designator" at -68.88,-4.59 h13.78
Mechanical 15:
  lines w6: -99.37,-67.24 98.43,-67.24 98.43,67.24 -99.37,67.24 -99.37,-67.24
  lines w7.87: -15.07,-0.16 15.11,-0.16 ; 0.02,-15.25 0.02,14.92
3D body: height 10, standoff 0, extent 7.87,0 17.87,10
3D body "axe510127.step": height 30.32, standoff 0, extent -88.58,-49.21 88.58,49.21